# Altium footprint library PCB - CONNECTOR - MOLEX - MOLEX 395021009.PcbLib: 1 footprints
Each footprint in its own frame and in the unit in brackets; x right, y up, seen from the top. Pads: shape width x height; smd on the part's side, far side on the other; paste and mask are expansions set on the pad; w line width, h text height; cw(c..) or ccw(c..) is an arc to the next point about the centre after c.
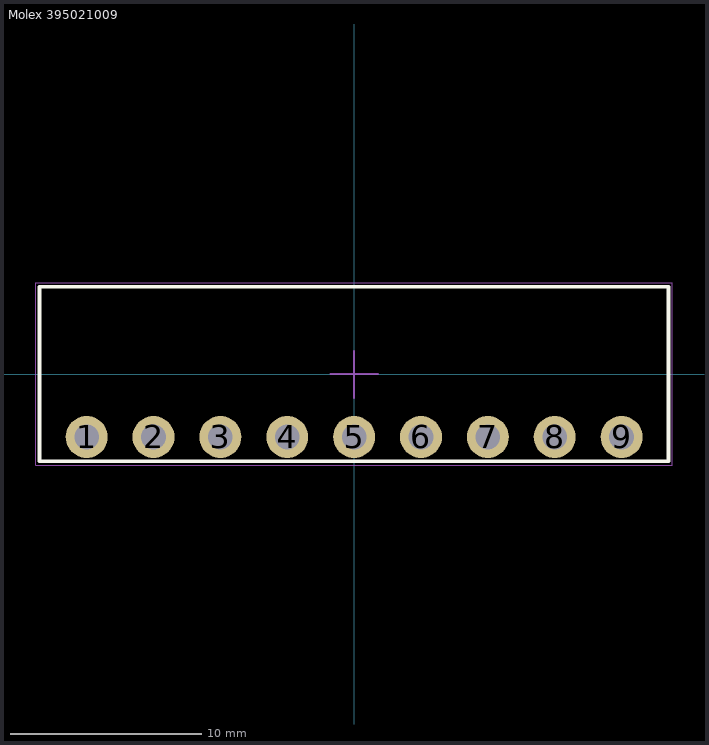
[diagram p0: the footprint, top view; thin cyan lines are the x and y axes]

## Molex 395021009 [mil] "9 Position Terminal Block Header, Male Pins, 3.5mm Pitch,32.97mmx9.2mm Body, 90°, Right Angle, THT"
height 287.4
pads (9):
  round 86.61 hole 51: 1(-552,-130) 2(-414,-130) 3(-276,-130) 4(-138,-130) 5(0,-130) 6(138,-130) 7(276,-130) 8(414,-130) 9(552,-130)
Top Overlay:
  lines w7.87: -649,-180 649,-180 649,180 -649,180 -649,-180
Mechanical 13:
  lines w3.94: -649,-180 -649,180 649,180 649,-180 -649,-180
Mechanical 15 (Mech15):
  lines w1.97: -656.89,-187.87 656.39,-187.87 656.39,187.87 -656.89,187.87 -656.89,-187.87
  lines w3.94: -49.21,0 0,0 ; 0,-49.21 0,0 ; 0,47.24 0,0 ; 49.21,0 0,0
3D body "Molex - 395021009 v1.step": height 280, standoff -140, extent -649,-180 649,180